# Altium integrated library Francisco_Lib.IntLib: 77 symbols (part 3 of 3)
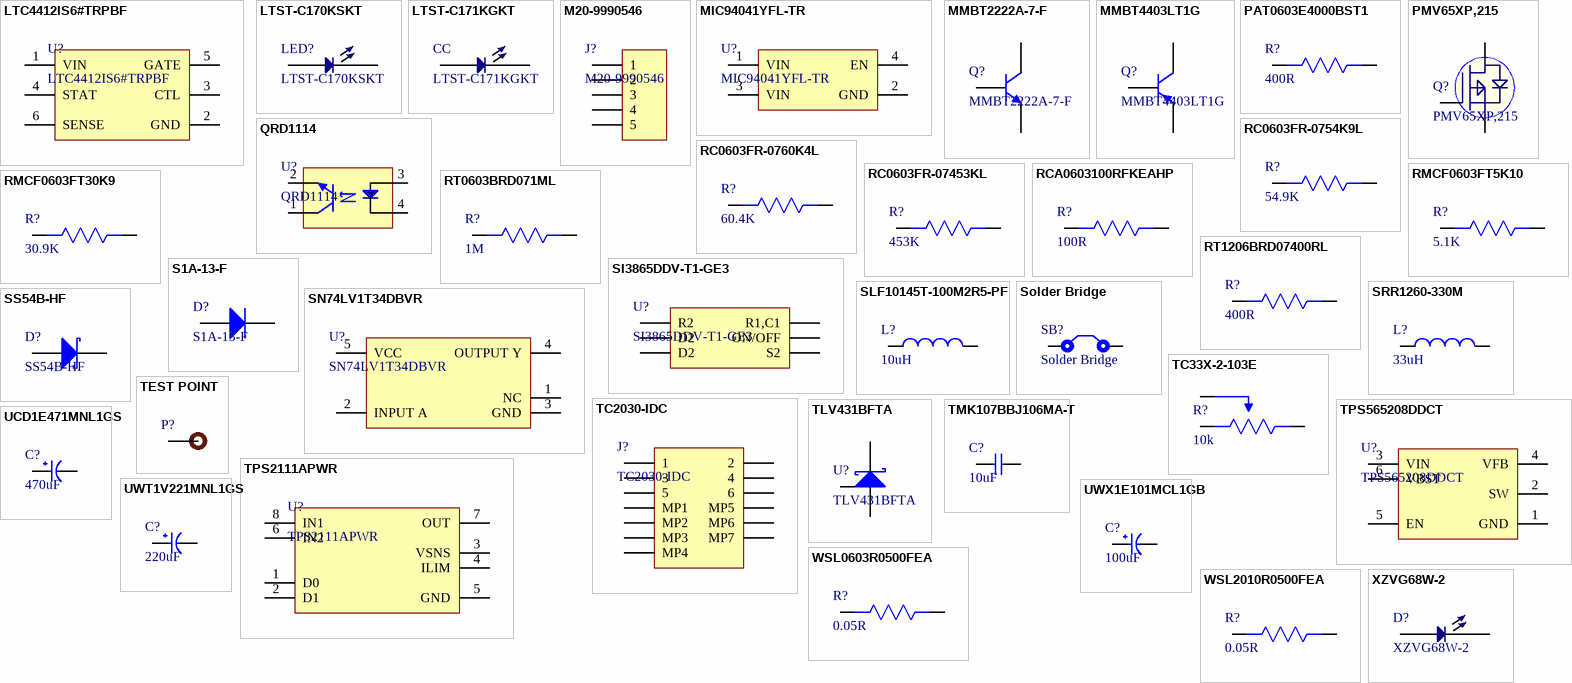
[diagram p3: symbols LTC4412IS6#TRPBF to XZVG68W-2]

## RT1206BRD07400RL
designator R?, comment 400R
RES SMD 400 OHM 0.1% 1/4W 1206; Manufacturer: Yageo; Manufacturer Part Number: RT1206BRD07400RL; Max Power Dissipation: 250mW; Temperature Coefficient: 25ppm/°C; Supplier 1: Digi-Key; RoHS: Yes; Category: Chip SMD Resistors; Stock 1: 6830; Pricing 1: 1=0.62000, 10=0.47600, 100=0.20000, 1000=0.11034, 2500=0.10344 (USD); Case/Package: 1206; Min Operating Temperature: -55°C; Max Operating Temperature: 155°C; Resistance: 400R; Tolerance: 0.1%; Packaging: Tape and Reel; Resistor Type: Thin Film; Number of Terminations: 2; Features: Moisture Resistant; Length: 0.122inch; Width: 0.063inch; Height: 0.026inch; RoHS Compliant: Yes; ComponentLink1URL: http://www.yageo.com/documents/recent/PYu-RT_1-to-0.01_RoHS_L_8.pdf?src-supplier=Digi-Key; ComponentLink1Description: http://www.yageo.com/documents/recent/PYu-RT_1-to-0.01_RoHS_L_8.pdf?src-supplier=Digi-Key; Supplier Part Number 1: 13-RT1206BRD07400RLCT-ND
footprint Res1206
pins: 1, 2

## S1A-13-F
designator D?
Diode Switching 50V 1A 2-Pin SMA T/R; Manufacturer: Diodes; Element Configuration: Single; Reverse Recovery Time: 3us; Peak Non-Repetitive Surge Current: 30A; Max Reverse Current: 5uA; Forward Voltage: 1.1V; Recovery Time: 1.8us; Polarity: Standard; Capacitance: 10pF; ComponentLink1URL: http://www.mouser.com/ds/2/115/ds16008-60440.pdf?src-supplier=Mouser; ComponentLink1Description: http://www.mouser.com/ds/2/115/ds16008-60440.pdf?src-supplier=Mouser; ComponentLink2URL: http://www.diodes.com///datasheets/ds16008.pdf?src-supplier=Avnet; ComponentLink2Description: http://www.diodes.com///datasheets/ds16008.pdf?src-supplier=Avnet; ComponentLink3URL: http://www.te.com/commerce/DocumentDelivery/DDEController?Action=showdoc&DocId=Data+Sheet%7FRPII%2F2%7F0415%7Fpdf%7FEnglish%7FENG_DS_RPIIX2_0415.pdf&src-supplier=Digi-Key; ComponentLink3Description: http://www.te.com/commerce/DocumentDelivery/DDEController?Action=showdoc&DocId=Data+Sheet%7FRPII%2F2%7F0415%7Fpdf%7FEnglish%7FENG_DS_RPIIX2_0415.pdf&src-supplier=Digi-Key; ComponentLink4URL: https://www.diodes.com/assets/Datasheets/ds16008.pdf?src-supplier=Digi-Key; ComponentLink4Description: https://www.diodes.com/assets/Datasheets/ds16008.pdf?src-supplier=Digi-Key; Supplier 1: Digi-Key; Manufacturer Part Number: S1A-13-F; RoHS: Yes; Category: Rectifier Diodes; Stock 1: 647079; Pricing 1: 1=0.26000, 10=0.21300, 100=0.11290, 500=0.07424, 1000=0.05049, 2000=0.04554 (USD); Mount: Surface Mount; Case/Package: SMA; Number of Pins: 2; Weight: 0.002258oz; Min Operating Temperature: -65°C; Max Operating Temperature: 150°C; Forward Current: 1A; Max Repetitive Reverse Voltage (Vrrm): 50V; Packaging: Tape and Reel; Package Quantity: 5000; Max Surge Current: 30A; Reverse Voltage (DC): 50V; Average Rectified Current: 1A; Voltage Rating (DC): 50V; Current Rating: 1A; Output Current: 1A; Max Reverse Voltage (DC): 50V; Max Forward Surge Current (Ifsm): 30A; Termination: SMD/SMT; Series: -; Length: 4.6mm; Width: 2.92mm; Height: 2.1mm; Radiation Hardening: No; Lead Free: Lead Free; REACH SVHC: No SVHC; RoHS Compliant: Yes; ComponentLink5URL: https://datasheet.ciiva.com/911/ds16003-911872.pdf?src-supplier=Digi-Key; ComponentLink5Description: https://datasheet.ciiva.com/911/ds16003-911872.pdf?src-supplier=Digi-Key; ComponentLink6URL: https://datasheet.ciiva.com/27052/1541520-27052419.pdf?src-supplier=Jameco; ComponentLink6Description: https://datasheet.ciiva.com/27052/1541520-27052419.pdf?src-supplier=Jameco; ComponentLink7URL: https://datasheet.ciiva.com/22695/1911706-22695830.pdf?src-supplier=Element14; ComponentLink7Description: https://datasheet.ciiva.com/22695/1911706-22695830.pdf?src-supplier=Element14; ComponentLink8URL: https://datasheet.ciiva.com/16199/ds16003-16199336.pdf?src-supplier=Future+Electronics; ComponentLink8Description: https://datasheet.ciiva.com/16199/ds16003-16199336.pdf?src-supplier=Future+Electronics; ComponentLink9URL: https://datasheet.ciiva.com/4453/ds16003-83672-4453580.pdf?src-supplier=Mouser; ComponentLink9Description: https://datasheet.ciiva.com/4453/ds16003-83672-4453580.pdf?src-supplier=Mouser; ComponentLink10URL: https://datasheet.ciiva.com/25953/ds16003-25953033.pdf?src-supplier=Avnet+Europe; ComponentLink10Description: https://datasheet.ciiva.com/25953/ds16003-25953033.pdf?src-supplier=Avnet+Europe; ComponentLink11URL: https://datasheet.ciiva.com/8301/ds16003-8301429.pdf?src-supplier=Avnet; ComponentLink11Description: https://datasheet.ciiva.com/8301/ds16003-8301429.pdf?src-supplier=Avnet; Supplier Part Number 1: S1A-FDICT-ND
footprint SMA
pins: 1, 2

## SI3865DDV-T1-GE3
designator U?
IC PWR SWITCH P-CHAN 1:1 6TSOP; Manufacturer: Vishay; Output Current: 1A; Number of Outputs: 1; Max Power Dissipation: 830mW; Max Supply Voltage: 12V; Min Supply Voltage: 1.5V; Interface: On/Off; Max Output Current: 2.8A; On-State Resistance: 165mR; Output Configuration: High Side; On-state Resistance-Max: 54mR; Supplier 1: Digi-Key; Manufacturer Part Number: SI3865DDV-T1-GE3; Stock 1: 54870; Pricing 1: 1=0.58, 10=0.494, 25=0.462, 100=0.3432, 500=0.26796, 1000=0.2178 (USD); Mount: Surface Mount; Case/Package: TSOP; Number of Pins: 6; Weight: 0.000705oz; Min Operating Temperature: -55°C; Max Operating Temperature: 150°C; Packaging: Tape and Reel; Package Quantity: 3000; Power Dissipation: 830mW; Current Rating: 2.8A; Series: TrenchFET®; Rated Current-Max: 2.8A; Length: 3.1mm; Width: 1.7mm; Height: 1mm; Radiation Hardening: No; REACH SVHC: No SVHC; Lead Free: Lead Free; RoHS Compliant: Yes; ComponentLink1URL: http://www.mouser.com/ds/2/427/si3865ddv-256526.pdf?src-supplier=Mouser; ComponentLink1Description: http://www.mouser.com/ds/2/427/si3865ddv-256526.pdf?src-supplier=Mouser; ComponentLink2URL: http://www.vishay.com/docs/67998/si3865ddv.pdf?src-supplier=Avnet; ComponentLink2Description: http://www.vishay.com/docs/67998/si3865ddv.pdf?src-supplier=Avnet; ComponentLink3URL: https://www.verical.com/server-webapp/html/getDatasheet?partID=710254&src-supplier=Verical; ComponentLink3Description: https://www.verical.com/server-webapp/html/getDatasheet?partID=710254&src-supplier=Verical; ComponentLink4URL: https://media.digikey.com/pdf/Data%20Sheets/Vishay%20Siliconix%20PDFs/Si3865DDV.pdf?src-supplier=Digi-Key; ComponentLink4Description: https://media.digikey.com/pdf/Data%20Sheets/Vishay%20Siliconix%20PDFs/Si3865DDV.pdf?src-supplier=Digi-Key; Supplier Part Number 1: SI3865DDV-T1-GE3CT-ND
footprint 6-TSOP
pins: 1 R2, 2 D2, 3 D2, 4 S2, 5 ON/OFF, 6 R1,C1

## SLF10145T-100M2R5-PF
designator L?, comment 10uH
FIXED IND 10UH 2.5A 43.7 MOHM; Manufacturer: TDK; Manufacturer Part Number: SLF10145T-100M2R5-PF; Core Material: Ferrite; Tolerance: 20%; Saturation Current: 3A; Shielding: Shielded; DC Resistance (DCR): 36.4mR; Test Frequency: 1kHz; Supplier 1: Digi-Key; Stock 1: 3269; Pricing 1: 1=1.05, 10=0.975, 25=0.9, 50=0.75, 100=0.705, 250=0.63 (USD); Mount: Surface Mount; Case/Package: Nonstandard; Number of Pins: 2; Min Operating Temperature: -40°C; Max Operating Temperature: 105°C; Inductance: 10uH; Max DC Current: 2.5A; Package Quantity: 500; Current Rating: 2.5A; Packaging: Tape and Reel; Inductance Tolerance: 20%; Resistor Type: Wirewound; Termination: SMD/SMT; DC Current: 2.5A; RMS Current (Irms): 3A; Series: SLF; Rated Current-Max: 3A; Length: 10.1mm; Width: 0.398inch; Height: 4.5mm; Height - Seated (Max): 0.189inch; Depth: 10.4mm; Radiation Hardening: No; REACH SVHC: No SVHC; Military Standard: Not; Lead Free: Lead Free; RoHS Compliant: Yes; ComponentLink1URL: http://www.farnell.com/datasheets/1838969.pdf?src-supplier=Element14; ComponentLink1Description: http://www.farnell.com/datasheets/1838969.pdf?src-supplier=Element14; ComponentLink2URL: http://uk.rs-online.com/webdocs/14e9/0900766b814e91a9.pdf?src-supplier=RSComponents; ComponentLink2Description: http://uk.rs-online.com/webdocs/14e9/0900766b814e91a9.pdf?src-supplier=RSComponents; ComponentLink3URL: http://components.arrow.com/part/dataview/42010891S8914805N1165?src-supplier=Arrow+Electronics; ComponentLink3Description: http://components.arrow.com/part/dataview/42010891S8914805N1165?src-supplier=Arrow+Electronics; ComponentLink4URL: http://datasheet.iiic.cc/tdk/SLF10145T-100M2R5-PF.pdf?src-supplier=IIIC; ComponentLink4Description: http://datasheet.iiic.cc/tdk/SLF10145T-100M2R5-PF.pdf?src-supplier=IIIC; Supplier Part Number 1: 445-1975-6-ND
footprint SLF10145T-100M2R5-PF
pins: 1, 2

## SN74LV1T34DBVR
designator U?
IC BUF NON-INVERT 5.5V SOT23-5; Manufacturer: Texas Instruments; Number of Elements: 1; Logic Function: Buffer,Inverting; High Level Output Current: -8mA; Low Level Output Current: 8mA; Min Supply Voltage: 1.6V; Polarity: Non-Inverting; Propagation Delay: 15.5ns; Quiescent Current: 1uA; Supplier 1: Digi-Key; Manufacturer Part Number: SN74LV1T34DBVR; Stock 1: 37360; Pricing 1: 1=0.43, 10=0.349, 25=0.3192, 100=0.2374, 250=0.2152, 500=0.17808, 1000=0.13356 (USD); Mount: Surface Mount; Case/Package: SOT-23-5; Number of Pins: 5; Weight: 0.000353oz; Min Operating Temperature: -40°C; Max Operating Temperature: 125°C; Packaging: Tape and Reel; Number of Bits per Element: 1; Number of Bits: 1; Package Quantity: 3000; Max Supply Voltage: 5.5V; Number of Input Lines: 1; Number of Output Lines: 1; Operating Supply Current: 8mA; Number of Channels: 1; Number of Inputs: 1; Number of Outputs: 1; Radiation Hardening: No; RoHS Compliant: Yes; REACH SVHC: No SVHC; Lead Free: Lead Free; ComponentLink1URL: http://www.ti.com/lit/pdf/sdyu001?src-supplier=Digi-Key; ComponentLink1Description: http://www.ti.com/lit/pdf/sdyu001?src-supplier=Digi-Key; ComponentLink2URL: http://www.ti.com/lit/ds/symlink/sn74lv1t34.pdf?src-supplier=Avnet; ComponentLink2Description: http://www.ti.com/lit/ds/symlink/sn74lv1t34.pdf?src-supplier=Avnet; Supplier Part Number 1: 296-37176-6-ND
footprint SOT-23-5
pins: 1 NC, 2 INPUT A, 3 GND, 4 OUTPUT Y, 5 VCC

## Solder Bridge
designator SB?
Solder Bridge ON
footprint Solder Bridge (Solder Bridge ON)
pins: 1, 2

## SRR1260-330M
designator L?, comment 33uH
FIXED IND 33UH 3A 60 MOHM SMD; Manufacturer: Bourns; Manufacturer Part Number: SRR1260330M; Core Material: Ferrite; Material: Steel; Tolerance: 20%; DC Resistance (DCR): 60mR; Self Resonant Frequency: 9.97MHz; Shielding: Shielded; Saturation Current: 2.8A; Test Frequency: 100kHz; Q Factor: 27; ComponentLink1URL: http://www.farnell.com/datasheets/2608403.pdf?src-supplier=Newark; ComponentLink1Description: http://www.farnell.com/datasheets/2608403.pdf?src-supplier=Newark; ComponentLink2URL: https://www.alliedelec.com/m/d/845565468e1e76a1db638ca94afd232b.pdf?src-supplier=Allied+Electronics; ComponentLink2Description: https://www.alliedelec.com/m/d/845565468e1e76a1db638ca94afd232b.pdf?src-supplier=Allied+Electronics; ComponentLink3URL: http://www.bourns.com/pdfs/SRR1260.pdf?src-supplier=Avnet; ComponentLink3Description: http://www.bourns.com/pdfs/SRR1260.pdf?src-supplier=Avnet; ComponentLink4URL: http://www.bourns.com/pdfs/SRR1260.pdf?src-supplier=Avnet+Europe; ComponentLink4Description: http://www.bourns.com/pdfs/SRR1260.pdf?src-supplier=Avnet+Europe; ComponentLink5URL: https://www.bourns.com/docs/Product-Datasheets/SRR1260.pdf?src-supplier=Digi-Key; ComponentLink5Description: https://www.bourns.com/docs/Product-Datasheets/SRR1260.pdf?src-supplier=Digi-Key; ComponentLink6URL: https://datasheet.ciiva.com/11802/0900766b80defded-11802925.pdf?src-supplier=RSComponents; ComponentLink6Description: https://datasheet.ciiva.com/11802/0900766b80defded-11802925.pdf?src-supplier=RSComponents; ComponentLink7URL: https://datasheet.ciiva.com/7849/1430852-7849592.pdf?src-supplier=Element14; ComponentLink7Description: https://datasheet.ciiva.com/7849/1430852-7849592.pdf?src-supplier=Element14; ComponentLink8URL: https://datasheet.ciiva.com/1062/srr1260-1062569.pdf?src-supplier=Digi-Key; ComponentLink8Description: https://datasheet.ciiva.com/1062/srr1260-1062569.pdf?src-supplier=Digi-Key; ComponentLink9URL: https://datasheet.ciiva.com/1062/srr1260-1062570.pdf?src-supplier=Digi-Key; ComponentLink9Description: https://datasheet.ciiva.com/1062/srr1260-1062570.pdf?src-supplier=Digi-Key; ComponentLink10URL: https://datasheet.ciiva.com/17285/srr1260-17285818.pdf?src-supplier=Avnet+Europe; ComponentLink10Description: https://datasheet.ciiva.com/17285/srr1260-17285818.pdf?src-supplier=Avnet+Europe; ComponentLink11URL: https://datasheet.ciiva.com/30080/srr1260-30080186.pdf?src-supplier=Onlinecomponents.com; ComponentLink11Description: https://datasheet.ciiva.com/30080/srr1260-30080186.pdf?src-supplier=Onlinecomponents.com; ComponentLink12URL: https://datasheet.ciiva.com/1062/srr1260-1062571.pdf?src-supplier=Digi-Key; ComponentLink12Description: https://datasheet.ciiva.com/1062/srr1260-1062571.pdf?src-supplier=Digi-Key; ComponentLink13URL: https://datasheet.ciiva.com/8079/70796-8079675.pdf?src-supplier=Element14; ComponentLink13Description: https://datasheet.ciiva.com/8079/70796-8079675.pdf?src-supplier=Element14; ComponentLink14URL: https://datasheet.ciiva.com/17112/70277056-17112251.pdf?src-supplier=Allied+Electronics; ComponentLink14Description: https://datasheet.ciiva.com/17112/70277056-17112251.pdf?src-supplier=Allied+Electronics; ComponentLink15URL: https://datasheet.ciiva.com/6161/70796-6161164.pdf?src-supplier=Farnell; ComponentLink15Description: https://datasheet.ciiva.com/6161/70796-6161164.pdf?src-supplier=Farnell; ComponentLink16URL: https://datasheet.ciiva.com/8517/srr1260-8517118.pdf?src-supplier=Avnet; ComponentLink16Description: https://datasheet.ciiva.com/8517/srr1260-8517118.pdf?src-supplier=Avnet; ComponentLink17URL: https://datasheet.ciiva.com/48691/001056636-da-01-en-mag-abge-l-ind-srr1260-150m-15uh-5-0a-48691157.pdf?src-supplier=Conrad; ComponentLink17Description: https://datasheet.ciiva.com/48691/001056636-da-01-en-mag-abge-l-ind-srr1260-150m-15uh-5-0a-48691157.pdf?src-supplier=Conrad; Supplier 1: Newark; RoHS: Yes; Category: Fixed Inductors; Mount: Surface Mount; Case/Package: Nonstandard; Number of Pins: 2; Min Operating Temperature: -40°C; Max Operating Temperature: 125°C; Inductance: 33uH; Max DC Current: 3A; Current Rating: 3A; Packaging: Tape and Reel; Termination: SMD/SMT; Package Quantity: 600; Resistor Type: Wirewound; DC Current: 3A; Inductance Tolerance: 20%; RMS Current (Irms): 3A; Frequency: 9.97MHz; Resistance: 60MR; Length: 12.5mm; Width: 12.5mm; Height: 6mm; Depth: 12.8mm; Height - Seated (Max): 0.256inch; Military Standard: Not; REACH SVHC: No SVHC; ComponentLink18URL: https://datasheet.ciiva.com/11800/0900766b80defded-11800359.pdf?src-supplier=RSComponents; ComponentLink18Description: https://datasheet.ciiva.com/11800/0900766b80defded-11800359.pdf?src-supplier=RSComponents; ComponentLink19URL: https://datasheet.ciiva.com/1049/srr1260-1049969.pdf?src-supplier=Digi-Key; ComponentLink19Description: https://datasheet.ciiva.com/1049/srr1260-1049969.pdf?src-supplier=Digi-Key; ComponentLink20URL: https://datasheet.ciiva.com/1049/srr1260-1049970.pdf?src-supplier=Digi-Key; ComponentLink20Description: https://datasheet.ciiva.com/1049/srr1260-1049970.pdf?src-supplier=Digi-Key; ComponentLink21URL: https://datasheet.ciiva.com/1049/srr1260-1049971.pdf?src-supplier=Digi-Key; ComponentLink21Description: https://datasheet.ciiva.com/1049/srr1260-1049971.pdf?src-supplier=Digi-Key; ComponentLink22URL: https://datasheet.ciiva.com/7849/1430852-7849785.pdf?src-supplier=Element14; ComponentLink22Description: https://datasheet.ciiva.com/7849/1430852-7849785.pdf?src-supplier=Element14; ComponentLink23URL: https://datasheet.ciiva.com/7307/1914016-7307757.pdf?src-supplier=Newark; ComponentLink23Description: https://datasheet.ciiva.com/7307/1914016-7307757.pdf?src-supplier=Newark; ComponentLink24URL: https://datasheet.ciiva.com/30241/srr1260-30241870.pdf?src-supplier=Onlinecomponents.com; ComponentLink24Description: https://datasheet.ciiva.com/30241/srr1260-30241870.pdf?src-supplier=Onlinecomponents.com; ComponentLink25URL: https://datasheet.ciiva.com/8517/srr1260-8517142.pdf?src-supplier=Avnet; ComponentLink25Description: https://datasheet.ciiva.com/8517/srr1260-8517142.pdf?src-supplier=Avnet; ComponentLink26URL: https://datasheet.ciiva.com/8517/srr1260-8517146.pdf?src-supplier=Avnet; ComponentLink26Description: https://datasheet.ciiva.com/8517/srr1260-8517146.pdf?src-supplier=Avnet; ComponentLink27URL: https://datasheet.ciiva.com/48690/001056646-da-01-en-mag-abge-l-ind-srr1260-330m-33uh-3-0a-48690775.pdf?src-supplier=Conrad; ComponentLink27Description: https://datasheet.ciiva.com/48690/001056646-da-01-en-mag-abge-l-ind-srr1260-330m-33uh-3-0a-48690775.pdf?src-supplier=Conrad; Supplier Part Number 1: 02J3136
footprint SRR1260-330M
pins: 1, 2

## SS54B-HF
designator D?
DIODE SCHOTTKY 5A 40V SMB; Manufacturer: Comchip; Supplier 1: Mouser; Manufacturer Part Number: SS54B-HF; RoHS: No; Stock 1: 2862; Pricing 1: 1=0.56000, 10=0.32900, 50=0.32900, 100=0.17100, 1000=0.11900, 10000=0.09000 (USD); Supplier Part Number 1: 750-SS54B-HF
footprint SMB
pins: 1, 2

## TC33X-2-103E
designator R?, comment 10k
TRIMMER 10K OHM 0.1W J LEAD TOP; Manufacturer: Bourns; Manufacturer Part Number: TC33X-2-103E; Tolerance: 25%; Resistance: 10kR; Number of Turns: 1; Power Rating: 100mW; Temperature Coefficient: 250ppm/°C; Voltage Rating (DC): 50V; Supplier 1: Digi-Key; Stock 1: 79201; Pricing 1: 1=0.26, 10=0.252, 25=0.2276, 50=0.217, 100=0.21, 250=0.196, 500=0.1785, 1000=0.161 (USD); Mount: Surface Mount; Color: Silver; Weight: 29.4mg; Contact Plating: Copper,Tin,Silver; Min Operating Temperature: -40°C; Max Operating Temperature: 100°C; Packaging: Tape and Reel; Package Quantity: 2500; Resistor Type: Cermet; Termination: Foot Print; Taper: Linear; Max Power Dissipation: 100mW; Series: TC33; Resistance Tolerance: 25%; Length: 3mm; Width: 0.118inch; Height: 0.047inch; Depth: 3.8mm; Radiation Hardening: No; REACH SVHC: No SVHC; Military Standard: Not; Lead Free: Lead Free; RoHS Compliant: Yes; ComponentLink1URL: http://www.farnell.com/datasheets/2146212.pdf?src-supplier=Element14; ComponentLink1Description: http://www.farnell.com/datasheets/2146212.pdf?src-supplier=Element14; ComponentLink2URL: http://www.farnell.com/datasheets/1520225.pdf?src-supplier=Element14; ComponentLink2Description: http://www.farnell.com/datasheets/1520225.pdf?src-supplier=Element14; ComponentLink3URL: http://uk.rs-online.com/webdocs/0274/0900766b802749b3.pdf?src-supplier=RSComponents; ComponentLink3Description: http://uk.rs-online.com/webdocs/0274/0900766b802749b3.pdf?src-supplier=RSComponents; ComponentLink4URL: https://www.bourns.com/docs/Product-Datasheets/TC33.pdf?src-supplier=Digi-Key; ComponentLink4Description: https://www.bourns.com/docs/Product-Datasheets/TC33.pdf?src-supplier=Digi-Key; ComponentLink5URL: http://www.bourns.com/pdfs/tc33.pdf?src-supplier=Avnet; ComponentLink5Description: http://www.bourns.com/pdfs/tc33.pdf?src-supplier=Avnet; ComponentLink6URL: https://www.verical.com/server-webapp/html/getDatasheet?partID=183773&src-supplier=Verical; ComponentLink6Description: https://www.verical.com/server-webapp/html/getDatasheet?partID=183773&src-supplier=Verical; ComponentLink7URL: http://www.bourns.com/pdfs/tc33.pdf?src-supplier=Avnet+Europe; ComponentLink7Description: http://www.bourns.com/pdfs/tc33.pdf?src-supplier=Avnet+Europe; Supplier Part Number 1: TC33X-103EDKR-ND
footprint TC33X-2-103E
pins: 1, 2, 3

## TC2030-IDC
designator J?
CABLE ADAPTER 6 POS; Manufacturer: Tag-Connect; ComponentLink1URL: http://www.tag-connect.com/Materials/TC2030-MCP%20Datasheet.pdf?src-supplier=Digi-Key; ComponentLink1Description: http://www.tag-connect.com/Materials/TC2030-MCP%20Datasheet.pdf?src-supplier=Digi-Key; Supplier 1: Digi-Key; Manufacturer Part Number: TC2030-IDC; Stock 1: 284; Pricing 1: 1=43.71 (USD); Package Quantity: 1; Supplier Part Number 1: TC2030-IDC-ND
footprint TC2030-IDC
pins: 1, 2, 3, 4, 5, 6, MP1, MP2, MP3, MP4, MP5, MP6, MP7

## TEST POINT
designator P?, comment Test Point  (value not drawn)
Test Point ON
footprint Test point
pins: 1

## TLV431BFTA
designator U?
IC VREF SHUNT 18V 0.5% SOT23; Manufacturer: Diodes Zetex; Max Input Voltage: 20V; Max Output Current: 15mA; Reference Type: Shunt,Adjustable; Min Output Voltage: 1.24V; Cathode Current: 100uA; Output Type: Adjustable; Supplier 1: Digi-Key; Manufacturer Part Number: TLV431BFTA; Stock 1: 51651; Pricing 1: 1=0.49, 10=0.417, 25=0.3888, 100=0.2889, 250=0.24444, 500=0.23332, 1000=0.17221 (USD); Mount: Surface Mount; Case/Package: SOT-23; Number of Pins: 3; Min Operating Temperature: -40°C; Max Operating Temperature: 125°C; Output Voltage: 18V; Packaging: Tape and Reel; Package Quantity: 1; Tolerance: 0.5%; Max Output Voltage: 18V; Output Current: 15mA; Reference Voltage: 18V; Length: 3.04mm; Height: 1.02mm; Width: 1.4mm; Radiation Hardening: No; REACH SVHC: No SVHC; Lead Free: Lead Free; ComponentLink1URL: https://www.diodes.com/assets/Datasheets/TLV431.pdf?src-supplier=Digi-Key; ComponentLink1Description: https://www.diodes.com/assets/Datasheets/TLV431.pdf?src-supplier=Digi-Key; ComponentLink2URL: http://www.farnell.com/datasheets/1904413.pdf?src-supplier=Element14; ComponentLink2Description: http://www.farnell.com/datasheets/1904413.pdf?src-supplier=Element14; ComponentLink3URL: http://www.farnell.com/datasheets/2100168.pdf?src-supplier=Element14; ComponentLink3Description: http://www.farnell.com/datasheets/2100168.pdf?src-supplier=Element14; ComponentLink4URL: http://www.diodes.com/datasheets/TLV431.pdf?src-supplier=Future+Electronics; ComponentLink4Description: http://www.diodes.com/datasheets/TLV431.pdf?src-supplier=Future+Electronics; Supplier Part Number 1: TLV431BFCT-ND
footprint sot-23
pins: 1 REF, 2 CATHODE, 3 ANODE

## TMK107BBJ106MA-T
designator C?, comment 10uF
CAP CER 10UF 25V X5R 0603; Manufacturer: Taiyo Yuden; Manufacturer Part Number: TMK107BBJ106MA-T; Tolerance: 20%; Supplier 1: Digi-Key; Stock 1: 85333; Pricing 1: 1=0.46, 10=0.32, 50=0.2238, 100=0.1918, 500=0.14386, 1000=0.12149 (USD); Mount: Surface Mount; Case/Package: 0603; Case Code (Imperial): 0603; Case Code (Metric): 1608; Min Operating Temperature: -55°C; Max Operating Temperature: 85°C; Packaging: Tape and Reel; Capacitance: 10uF; Voltage Rating: 25V; Lead Free: Lead Free; RoHS Compliant: Yes; ComponentLink1URL: http://ds.yuden.co.jp/TYCOMPAS/ut/detail.do?productNo=TMK107BBJ106MA-T&fileName=TMK107BBJ106MA-T_SS&mode=specSheetDownload&src-supplier=Digi-Key; ComponentLink1Description: http://ds.yuden.co.jp/TYCOMPAS/ut/detail.do?productNo=TMK107BBJ106MA-T&fileName=TMK107BBJ106MA-T_SS&mode=specSheetDownload&src-supplier=Digi-Key; Supplier Part Number 1: 587-6023-1-ND
footprint CAP-0603
pins: 1, 2

## TPS2111APWR
designator U?
IC OR CTRLR SRC SELECT 8TSSOP; Manufacturer: Texas Instruments; Number of Outputs: 1; Output Current: 1.25A; Number of Inputs: 2; Max Input Voltage: 5.5V; Min Input Voltage: 2.8V; Turn-On Delay Time: 1ms; Turn-Off Delay Time: 5ms; Operating Supply Current: 55uA; Max Power Dissipation: 387mW; On-State Resistance: 84mR; Output Voltage: 6V; Supplier 1: Digi-Key; Manufacturer Part Number: TPS2111APWR; RoHS: Yes; Category: Voltage Regulators - Switching; Stock 1: 14704; Pricing 1: 1=2.48000, 10=2.22500, 25=2.09880, 100=1.67900, 250=1.46916, 500=1.42718, 1000=1.13335 (USD); Case/Package: TSSOP; Number of Pins: 8; Weight: 0.001376oz; Min Operating Temperature: -40°C; Max Operating Temperature: 85°C; Package Quantity: 1; Packaging: Tape and Reel; Max Output Current: 1.25A; Current - Output 2: 1.25A; Operating Supply Voltage: 5.5V; Series: TPS2111A; Number of Circuits: 2; Nominal Supply Current: 55uA; Radiation Hardening: No; Lead Free: Lead Free; RoHS Compliant: Yes; REACH SVHC: No SVHC; ComponentLink1URL: https://datasheet.ciiva.com/1960/tps2110a-1960784.pdf?src-supplier=Digi-Key; ComponentLink1Description: https://datasheet.ciiva.com/1960/tps2110a-1960784.pdf?src-supplier=Digi-Key; ComponentLink2URL: https://datasheet.ciiva.com/15109/getdatasheetpartid-292403-15109270.pdf?src-supplier=Verical; ComponentLink2Description: https://datasheet.ciiva.com/15109/getdatasheetpartid-292403-15109270.pdf?src-supplier=Verical; ComponentLink3URL: https://datasheet.ciiva.com/1960/tps2110a-1960785.pdf?src-supplier=Digi-Key; ComponentLink3Description: https://datasheet.ciiva.com/1960/tps2110a-1960785.pdf?src-supplier=Digi-Key; ComponentLink4URL: https://datasheet.ciiva.com/1645/1836501-1645122.pdf?src-supplier=Newark; ComponentLink4Description: https://datasheet.ciiva.com/1645/1836501-1645122.pdf?src-supplier=Newark; ComponentLink5URL: https://datasheet.ciiva.com/7986/1836501-7986421.pdf?src-supplier=Element14; ComponentLink5Description: https://datasheet.ciiva.com/7986/1836501-7986421.pdf?src-supplier=Element14; ComponentLink6URL: https://datasheet.ciiva.com/28483/1836501-28483178.pdf?src-supplier=Element14; ComponentLink6Description: https://datasheet.ciiva.com/28483/1836501-28483178.pdf?src-supplier=Element14; ComponentLink7URL: https://datasheet.ciiva.com/1960/tps2110a-1960783.pdf?src-supplier=Digi-Key; ComponentLink7Description: https://datasheet.ciiva.com/1960/tps2110a-1960783.pdf?src-supplier=Digi-Key; ComponentLink8URL: https://datasheet.ciiva.com/3232/tps2110a-3232511.pdf?src-supplier=Avnet; ComponentLink8Description: https://datasheet.ciiva.com/3232/tps2110a-3232511.pdf?src-supplier=Avnet; Supplier Part Number 1: 296-16936-1-ND
footprint 8-TSSOP
pins: 1 D0, 2 D1, 3 VSNS, 4 ILIM, 5 GND, 6 IN2, 7 OUT, 8 IN1

## TPS565208DDCT
designator U?
IC REG BUCK ADJ 5A TSOT23-6; Manufacturer: Texas Instruments; Output Type: Adjustable; Output Configuration: Positive; Number of Outputs: 1; Min Input Voltage: 4.5V; Max Input Voltage: 17V; Min Output Voltage: 760mV; Max Output Voltage: 7V; Switching Frequency: 500kHz; Synchronous Rectifier: Yes; Supplier 1: Digi-Key; Manufacturer Part Number: TPS565208DDCT; Stock 1: 1895; Pricing 1: 1=1.75, 10=1.576, 25=1.4868, 100=1.2666 (USD); Mount: Surface Mount; Case/Package: SOT-23-6; Min Operating Temperature: -40°C; Max Operating Temperature: 125°C; Packaging: Tape and Reel; Output Current: 5A; RoHS Compliant: Yes; ComponentLink1URL: http://www.ti.com/lit/ds/symlink/tps565208.pdf?src-supplier=Farnell; ComponentLink1Description: http://www.ti.com/lit/ds/symlink/tps565208.pdf?src-supplier=Farnell; ComponentLink2URL: http://www.ti.com/lit/ds/symlink/tps565208.pdf?src-supplier=Digi-Key; ComponentLink2Description: http://www.ti.com/lit/ds/symlink/tps565208.pdf?src-supplier=Digi-Key; ComponentLink3URL: http://www.ti.com/lit/ds/symlink/tps565208.pdf?src-supplier=Newark; ComponentLink3Description: http://www.ti.com/lit/ds/symlink/tps565208.pdf?src-supplier=Newark; Supplier Part Number 1: 296-47502-6-ND
footprint SOT 23-6
pins: 1 GND, 2 SW, 3 VIN, 4 VFB, 5 EN, 6 VBST

## UCD1E471MNL1GS
designator C?, comment 470uF
CAP ALUM 470UF 20% 25V SMD; Manufacturer: Nichicon; Manufacturer Part Number: UCD1E471MNL1GS; Ripple Current: 850mA; Impedance: 80mR; Leakage Current: 3uA; Life (Hours): 5000Hour; Dissipation Factor: 0.14%; Supplier 1: Digi-Key; Stock 1: 0; Pricing 1: 1=0.96, 10=0.708, 50=0.566, 100=0.4852 (USD); Mount: Surface Mount,PCB; Case/Package: Radial; Min Operating Temperature: -55°C; Max Operating Temperature: 105°C; Capacitance: 470uF; Tolerance: 20%; Package Quantity: 1; Packaging: Tape and Reel; Voltage Rating: 25V; Voltage Rating (DC): 25V; Termination: SMD/SMT; Voltage: 25V; Features: General Purpose; Series: CD; Construction: Cylindrical; Diameter: 10mm; Length: 10mm; Height: 10mm; Height - Seated (Max): 0.394inch; Radiation Hardening: No; RoHS Compliant: Yes; ComponentLink1URL: http://nichicon-us.com/english/products/pdfs/e-ucd.pdf?src-supplier=Digi-Key; ComponentLink1Description: http://nichicon-us.com/english/products/pdfs/e-ucd.pdf?src-supplier=Digi-Key; ComponentLink2URL: http://www.mouser.com/ds/2/293/e-cd-22158.pdf?src-supplier=Mouser; ComponentLink2Description: http://www.mouser.com/ds/2/293/e-cd-22158.pdf?src-supplier=Mouser; ComponentLink3URL: http://uk.rs-online.com/webdocs/0ebd/0900766b80ebdadd.pdf?src-supplier=RSComponents; ComponentLink3Description: http://uk.rs-online.com/webdocs/0ebd/0900766b80ebdadd.pdf?src-supplier=RSComponents; ComponentLink4URL: http://www.nichicon.co.jp/english/products/pdfs/e-cd.pdf?src-supplier=Avnet; ComponentLink4Description: http://www.nichicon.co.jp/english/products/pdfs/e-cd.pdf?src-supplier=Avnet; ComponentLink5URL: http://products.nichicon.co.jp/en/pdf/XJA043/e-cd.pdf?src-supplier=Future+Electronics; ComponentLink5Description: http://products.nichicon.co.jp/en/pdf/XJA043/e-cd.pdf?src-supplier=Future+Electronics; ComponentLink6URL: https://www.verical.com/server-webapp/html/getDatasheet?partID=512790&src-supplier=Verical; ComponentLink6Description: https://www.verical.com/server-webapp/html/getDatasheet?partID=512790&src-supplier=Verical; ComponentLink7URL: http://www.nichicon.co.jp/english/products/pdfs/e-cd.pdf?src-supplier=Avnet+Europe; ComponentLink7Description: http://www.nichicon.co.jp/english/products/pdfs/e-cd.pdf?src-supplier=Avnet+Europe; Supplier Part Number 1: 493-6386-1-ND
footprint UCD1E471MNL1GS
pins: 1, 2

## UWT1V221MNL1GS
designator C?, comment 220uF
CAP ALUM 220UF 20% 35V SMD; Manufacturer: Nichicon; Manufacturer Part Number: UWT1V221MNL1GS; Dielectric Material: Aluminium; Ripple Current: 190mA; Leakage Current: 3uA; Life (Hours): 1000Hour; Dissipation Factor: 0.14%; Lead Diameter: 1.1mm; Supplier 1: Digi-Key; Stock 1: 329408; Pricing 1: 1=0.5, 10=0.354, 50=0.2674, 100=0.2329 (USD); Mount: Surface Mount; Case/Package: Radial; Number of Pins: 2; Min Operating Temperature: -55°C; Max Operating Temperature: 105°C; Capacitance: 220uF; Tolerance: 20%; Packaging: Tape and Reel; Package Quantity: 500; Voltage Rating: 35V; Voltage Rating (DC): 35V; Ripple Current (AC): 190mA; Termination: SMD/SMT; Voltage: 35V; Series: WT; Construction: Cylindrical; Diameter: 8mm; Length: 10mm; Height: 10mm; Lead Pitch: 0.327inch; Height - Seated (Max): 0.394inch; Radiation Hardening: No; REACH SVHC: No SVHC; Lead Free: Lead Free; RoHS Compliant: Yes; ComponentLink1URL: http://nichicon-us.com/english/products/pdfs/e-wt.pdf?src-supplier=Element14; ComponentLink1Description: http://nichicon-us.com/english/products/pdfs/e-wt.pdf?src-supplier=Element14; ComponentLink2URL: http://www.farnell.com/datasheets/1910938.pdf?src-supplier=Element14; ComponentLink2Description: http://www.farnell.com/datasheets/1910938.pdf?src-supplier=Element14; ComponentLink3URL: http://nichicon-us.com/english/products/pdfs/e-uwt.pdf?src-supplier=Digi-Key; ComponentLink3Description: http://nichicon-us.com/english/products/pdfs/e-uwt.pdf?src-supplier=Digi-Key; ComponentLink4URL: http://www.nichicon.co.jp/english/products/pdfs/e-ch_ref.pdf?src-supplier=Digi-Key; ComponentLink4Description: http://www.nichicon.co.jp/english/products/pdfs/e-ch_ref.pdf?src-supplier=Digi-Key; ComponentLink5URL: http://www.nichicon.co.jp/english/products/pdfs/e-wt.pdf?src-supplier=Digi-Key; ComponentLink5Description: http://www.nichicon.co.jp/english/products/pdfs/e-wt.pdf?src-supplier=Digi-Key; ComponentLink6URL: http://uk.rs-online.com/webdocs/0fa3/0900766b80fa3a91.pdf?src-supplier=RSComponents; ComponentLink6Description: http://uk.rs-online.com/webdocs/0fa3/0900766b80fa3a91.pdf?src-supplier=RSComponents; ComponentLink7URL: http://products.nichicon.co.jp/en/pdf/XJA043/e-wt.pdf?src-supplier=Future+Electronics; ComponentLink7Description: http://products.nichicon.co.jp/en/pdf/XJA043/e-wt.pdf?src-supplier=Future+Electronics; ComponentLink8URL: https://www.verical.com/server-webapp/html/getDatasheet?partID=212340&src-supplier=Verical; ComponentLink8Description: https://www.verical.com/server-webapp/html/getDatasheet?partID=212340&src-supplier=Verical; Supplier Part Number 1: 493-2205-1-ND
footprint UWT1V221MNL1GS
pins: 1, 2

## UWX1E101MCL1GB
designator C?, comment 100uF
CAP ALUM 100UF 20% 25V SMD; Manufacturer: Nichicon; Manufacturer Part Number: UWX1E101MCL1GB; Dielectric Material: Aluminium; Ripple Current: 110mA; Polarity: Polar; Leakage Current: 3uA; Life (Hours): 2000Hour; Dissipation Factor: 0.14%; Lead Diameter: 0.8mm; Supplier 1: Digi-Key; Stock 1: 30613; Pricing 1: 1=0.43, 10=0.301, 50=0.211, 100=0.1808, 500=0.13558 (USD); Mount: Surface Mount; Case/Package: Radial; Number of Pins: 2; Weight: 0.01lb; Min Operating Temperature: -40°C; Max Operating Temperature: 85°C; Capacitance: 100uF; Tolerance: 20%; Ripple Current (AC): 110mA; Voltage Rating: 25V; Packaging: Tape and Reel; Package Quantity: 1000; Voltage Rating (DC): 25V; Termination: SMD/SMT; Voltage: 25V; Series: WX; Construction: Cylindrical; Diameter: 8mm; Length: 5.4mm; Width: 0.25inch; Height: 5.4mm; Lead Pitch: 2.3mm; Height - Seated (Max): 0.213inch; Radiation Hardening: No; REACH SVHC: No SVHC; Lead Free: Lead Free; RoHS Compliant: Yes; ComponentLink1URL: http://nichicon-us.com/english/products/pdfs/e-uwx.pdf?src-supplier=Digi-Key; ComponentLink1Description: http://nichicon-us.com/english/products/pdfs/e-uwx.pdf?src-supplier=Digi-Key; ComponentLink2URL: http://www.nichicon.co.jp/english/products/pdfs/e-ch_ref.pdf?src-supplier=Mouser; ComponentLink2Description: http://www.nichicon.co.jp/english/products/pdfs/e-ch_ref.pdf?src-supplier=Mouser; ComponentLink3URL: http://www.nichicon.co.jp/english/products/pdfs/e-wx.pdf?src-supplier=Avnet; ComponentLink3Description: http://www.nichicon.co.jp/english/products/pdfs/e-wx.pdf?src-supplier=Avnet; ComponentLink4URL: http://uk.rs-online.com/webdocs/0fa3/0900766b80fa3a90.pdf?src-supplier=RSComponents; ComponentLink4Description: http://uk.rs-online.com/webdocs/0fa3/0900766b80fa3a90.pdf?src-supplier=RSComponents; ComponentLink5URL: http://nichicon-us.com/english/products/pdfs/e-wx.pdf?src-supplier=Future+Electronics; ComponentLink5Description: http://nichicon-us.com/english/products/pdfs/e-wx.pdf?src-supplier=Future+Electronics; ComponentLink6URL: http://www.nichicon.co.jp/english/products/pdfs/e-ch_ref.pdf?src-supplier=Avnet+Europe; ComponentLink6Description: http://www.nichicon.co.jp/english/products/pdfs/e-ch_ref.pdf?src-supplier=Avnet+Europe; ComponentLink7URL: http://www.farnell.com/datasheets/2364658.pdf?src-supplier=Element14; ComponentLink7Description: http://www.farnell.com/datasheets/2364658.pdf?src-supplier=Element14; Supplier Part Number 1: 493-2113-6-ND; Supplier 2: Digi-Key; RoHS: Yes; Category: Aluminum Electrolytic Capacitors; Stock 2: 25010; Pricing 2: 1=0.43000, 10=0.30100, 50=0.21100, 100=0.18080, 500=0.13558 (USD); ComponentLink8URL: https://datasheet.ciiva.com/11778/0900766b80fa3a90-11778418.pdf?src-supplier=RSComponents; ComponentLink8Description: https://datasheet.ciiva.com/11778/0900766b80fa3a90-11778418.pdf?src-supplier=RSComponents; ComponentLink9URL: https://datasheet.ciiva.com/17527/e-wx-17527624.pdf?src-supplier=Avnet+Europe; ComponentLink9Description: https://datasheet.ciiva.com/17527/e-wx-17527624.pdf?src-supplier=Avnet+Europe; ComponentLink10URL: https://datasheet.ciiva.com/5361/e-wx-11809-5361100.pdf?src-supplier=Mouser; ComponentLink10Description: https://datasheet.ciiva.com/5361/e-wx-11809-5361100.pdf?src-supplier=Mouser; ComponentLink11URL: https://datasheet.ciiva.com/28458/1912851-28458684.pdf?src-supplier=Element14; ComponentLink11Description: https://datasheet.ciiva.com/28458/1912851-28458684.pdf?src-supplier=Element14; ComponentLink12URL: https://datasheet.ciiva.com/96/e-wx-96650.pdf?src-supplier=Digi-Key; ComponentLink12Description: https://datasheet.ciiva.com/96/e-wx-96650.pdf?src-supplier=Digi-Key; ComponentLink13URL: https://datasheet.ciiva.com/96/e-wx-96651.pdf?src-supplier=Digi-Key; ComponentLink13Description: https://datasheet.ciiva.com/96/e-wx-96651.pdf?src-supplier=Digi-Key; ComponentLink14URL: https://datasheet.ciiva.com/96/e-wx-96652.pdf?src-supplier=Digi-Key; ComponentLink14Description: https://datasheet.ciiva.com/96/e-wx-96652.pdf?src-supplier=Digi-Key; ComponentLink15URL: https://datasheet.ciiva.com/11687/e-wx-11687148.pdf?src-supplier=Avnet; ComponentLink15Description: https://datasheet.ciiva.com/11687/e-wx-11687148.pdf?src-supplier=Avnet; ComponentLink16URL: https://datasheet.ciiva.com/16512/e-wx-16512638.pdf?src-supplier=Future+Electronics; ComponentLink16Description: https://datasheet.ciiva.com/16512/e-wx-16512638.pdf?src-supplier=Future+Electronics; Supplier Part Number 2: 493-2113-1-ND
footprint UWX1E101MCL1GB
pins: 1, 2

## WSL0603R0500FEA
designator R?, comment 0.05R
RES 0.05 OHM 1% 1/10W 0603; Manufacturer: Vishay Dale; Manufacturer Part Number: WSL0603R0500FEA18; Resistance: 50mR; Temperature Coefficient: 75ppm/°C; Power Rating: 200mW; Supplier 1: Mouser; Stock 1: 4596; Pricing 1: 1=0.96, 10=0.717, 50=0.717, 100=0.621, 1000=0.375, 10000=0.326 (USD); Case/Package: 0603; Case Code (Metric): 1608; Case Code (Imperial): 0603; Min Operating Temperature: -65°C; Max Operating Temperature: 170°C; Tolerance: 1%; Resistor Type: Metal Strip; Packaging: Tape and Reel; Package Quantity: 1; Number of Terminations: 2; Termination: SMD/SMT; Max Power Dissipation: 200mW; Features: Moisture Resistant; Series: WSL-HP; Resistance Tolerance: 1%; Length: 0.06inch; Width: 0.03inch; Height: 0.018inch; REACH SVHC: Unknown; Lead Free: Lead Free; RoHS Compliant: Yes; ComponentLink1URL: http://www.vishay.com/docs/31057/wslhigh.pdf?src-supplier=Digi-Key; ComponentLink1Description: http://www.vishay.com/docs/31057/wslhigh.pdf?src-supplier=Digi-Key; ComponentLink2URL: http://www.mouser.com/ds/2/427/wslhigh-101698.pdf?src-supplier=Mouser; ComponentLink2Description: http://www.mouser.com/ds/2/427/wslhigh-101698.pdf?src-supplier=Mouser; Supplier Part Number 1: 71-WSL0603R0500FEA18
footprint RES-0603
pins: 1, 2

## WSL2010R0500FEA
designator R?, comment 0.05R
RES 0.05 OHM 1% 1/2W 2010; Manufacturer: Vishay Dale; Manufacturer Part Number: WSL2010R0500FEA; Temperature Coefficient: 75ppm/°C; Resistance: 50mR; Power Rating: 500mW; Voltage Rating: 150mV; Supplier 1: Digi-Key; RoHS: No; Category: Chip SMD Resistors; Stock 1: 20000; Pricing 1: 1=0.92000, 10=0.81400, 25=0.74800, 50=0.68240, 100=0.59060, 250=0.49876, 500=0.42000, 1000=0.35000 (USD); Mount: Surface Mount; Case/Package: 2010; Number of Pins: 2; Contact Plating: Tin,Matte; Weight: 0.001372oz; Case Code (Metric): 5025; Case Code (Imperial): 2010; Min Operating Temperature: -65°C; Max Operating Temperature: 170°C; Resistor Type: Metal Element,Metal Strip; Tolerance: 1%; Features: Moisture Resistant; Number of Terminations: 2; Termination: SMD/SMT; Max Power Dissipation: 500mW; Package Quantity: 1; Packaging: Tape and Reel; Length: 5.08mm; Width: 0.1inch; Height: 0.635mm; Depth: 2.54mm; Radiation Hardening: No; REACH SVHC: No SVHC; Military Standard: Not; Lead Free: Lead Free; ComponentLink1URL: https://datasheet.ciiva.com/2483/wsl-2483729.pdf?src-supplier=Digi-Key; ComponentLink1Description: https://datasheet.ciiva.com/2483/wsl-2483729.pdf?src-supplier=Digi-Key; ComponentLink2URL: https://datasheet.ciiva.com/2483/wsl-2483730.pdf?src-supplier=Digi-Key; ComponentLink2Description: https://datasheet.ciiva.com/2483/wsl-2483730.pdf?src-supplier=Digi-Key; ComponentLink3URL: https://datasheet.ciiva.com/2483/wsl-2483731.pdf?src-supplier=Digi-Key; ComponentLink3Description: https://datasheet.ciiva.com/2483/wsl-2483731.pdf?src-supplier=Digi-Key; ComponentLink4URL: https://datasheet.ciiva.com/7695/wsl-7695158.pdf?src-supplier=Element14; ComponentLink4Description: https://datasheet.ciiva.com/7695/wsl-7695158.pdf?src-supplier=Element14; ComponentLink5URL: https://datasheet.ciiva.com/16215/wsl-16215947.pdf?src-supplier=Future+Electronics; ComponentLink5Description: https://datasheet.ciiva.com/16215/wsl-16215947.pdf?src-supplier=Future+Electronics; ComponentLink6URL: https://datasheet.ciiva.com/17177/wsl-17177243.pdf?src-supplier=Avnet+Europe; ComponentLink6Description: https://datasheet.ciiva.com/17177/wsl-17177243.pdf?src-supplier=Avnet+Europe; ComponentLink7URL: https://datasheet.ciiva.com/28621/1911169-28621837.pdf?src-supplier=Element14; ComponentLink7Description: https://datasheet.ciiva.com/28621/1911169-28621837.pdf?src-supplier=Element14; ComponentLink8URL: https://datasheet.ciiva.com/36857/442550-36857725.pdf?src-supplier=Element14; ComponentLink8Description: https://datasheet.ciiva.com/36857/442550-36857725.pdf?src-supplier=Element14; Supplier Part Number 1: WSLE-.05CT-ND
footprint RES 2010 (RES 50M OHM 1% 3/4W 2010)
pins: 1, 2

## XZVG68W-2
designator D?
LED GREEN CLEAR CHIP SMD; Manufacturer: SunLED; Lens Color: Colorless; Luminous Intensity: 49mcd; Test Current: 20mA; Viewing Angle: 120°; Dominant Wavelength: 570nm; Forward Voltage: 2.1V; Supplier 1: Digi-Key; Manufacturer Part Number: XZVG68W-2; Stock 1: 122154; Pricing 1: 1=0.37, 10=0.293, 100=0.1314, 500=0.11872, 1000=0.09752 (USD); Mount: Surface Mount; Case/Package: 0402; Color: Green; Case Code (Metric): 1005; Case Code (Imperial): 0402; Packaging: Tape and Reel; Lens Transparency: Clear; Length: 1mm; Width: 0.5mm; Height: 0.6mm; RoHS Compliant: Yes; ComponentLink1URL: https://www.sunledusa.com/products/spec/XZVG68W-2.pdf?src-supplier=Digi-Key; ComponentLink1Description: https://www.sunledusa.com/products/spec/XZVG68W-2.pdf?src-supplier=Digi-Key; ComponentLink2URL: http://www.sunledusa.com/products/spec/XZVG68W-2.pdf?src-supplier=Digi-Key; ComponentLink2Description: http://www.sunledusa.com/products/spec/XZVG68W-2.pdf?src-supplier=Digi-Key; Supplier Part Number 1: 1497-1219-6-ND
footprint LED 0402 (LED BLUE CLEAR CHIP SMD)
pins: 1, 2